# Altium footprint library Mechanical_Connectors_Rectangular_0.4_DF40.PcbLib: 1 footprints
Each footprint in its own frame and in the unit in brackets; x right, y up, seen from the top. Pads: shape width x height; smd on the part's side, far side on the other; paste and mask are expansions set on the pad; w line width, h text height; cw(c..) or ccw(c..) is an arc to the next point about the centre after c.
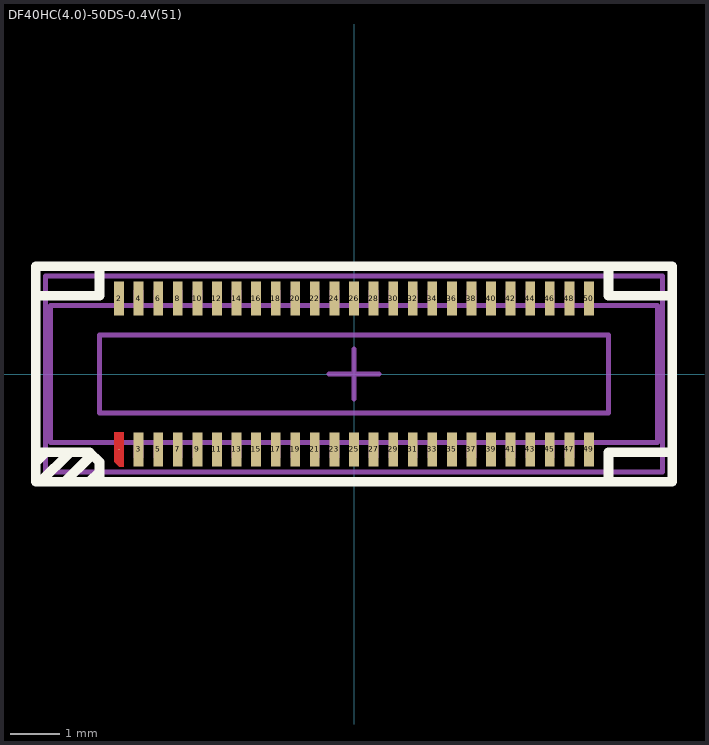
[diagram p0: the footprint, top view; thin cyan lines are the x and y axes]

## DF40HC(4.0)-50DS-0.4V(51) [mm]
height 4
pads (50):
  round 0.025 smd: 1(-4.8,-1.54)
  rect 0.2x0.7 smd: 2(-4.8,1.54) 3(-4.4,-1.54) 4(-4.4,1.54) 5(-4,-1.54) 6(-4,1.54) 7(-3.6,-1.54) 8(-3.6,1.54) 9(-3.2,-1.54) 10(-3.2,1.54) 11(-2.8,-1.54) 12(-2.8,1.54) 13(-2.4,-1.54) 14(-2.4,1.54) 15(-2,-1.54) 16(-2,1.54) 17(-1.6,-1.54) 18(-1.6,1.54) 19(-1.2,-1.54) 20(-1.2,1.54) 21(-0.8,-1.54) 22(-0.8,1.54) 23(-0.4,-1.54) 24(-0.4,1.54) 25(0,-1.54) 26(0,1.54) 27(0.4,-1.54) 28(0.4,1.54) 29(0.8,-1.54) 30(0.8,1.54) 31(1.2,-1.54) 32(1.2,1.54) 33(1.6,-1.54) 34(1.6,1.54) 35(2,-1.54) 36(2,1.54) 37(2.4,-1.54) 38(2.4,1.54) 39(2.8,-1.54) 40(2.8,1.54) 41(3.2,-1.54) 42(3.2,1.54) 43(3.6,-1.54) 44(3.6,1.54) 45(4,-1.54) 46(4,1.54) 47(4.4,-1.54) 48(4.4,1.54) 49(4.8,-1.54) 50(4.8,1.54)
Top Layer:
  region: -4.9,-1.19 -4.7,-1.19 -4.7,-1.89 -4.8,-1.89 -4.9,-1.79
Top Overlay:
  lines w0.2: -6.5,-1.8 -6.3,-1.6 ; -6.5,-1.6 -5.4,-1.6 -5.2,-1.8 -5.2,-2.2 ; -6.5,1.6 -5.2,1.6 -5.2,2.2 ; -6.4,-2.2 -5.8,-1.6 ; -5.9,-2.2 -5.4,-1.7 ; -5.4,-2.2 -5.2,-2 ; 5.2,-2.2 5.2,-1.6 6.5,-1.6 ; 5.2,2.2 5.2,1.6 6.5,1.6 ; -6.5,-2.2 -6.5,2.2 6.5,2.2 6.5,-2.2 -6.5,-2.2
Top Package:
  drawing of 158 lines, arcs and shapes, not listed
Top Comment:
  text ".Comment" at -3.26,-0.749 h2.3
Top Designator:
  text ".Designator" at -3.953,-0.736 h2.3
Top Border:
  lines w0.1: -0.5,0 0.5,0 ; 0,-0.5 0,0.5 ; -6.3,-2 6.3,-2 6.3,2 -6.3,2 -6.3,-2 ; -0.508,0 0.508,0 -0.508,0 ; 0,-0.508 0,0.508 0,-0.508
3D body "DF40HC(4.0)-50DS.stp": height 3.9, standoff 0, extent -6.3,-1.6 6.3,1.78